# EAGLE library part 6200XX11121_62001011121 (library WR-PHD)
WR-PHD 2.00 mm THT Pin Header Article Properties Pins 2 unitless; 3 unitless; 4 unitless; 6 unitless; 8 unitless; 10 unitless; 20 unitless; 32 unitless General Information Operating Temperature -40 °C up to +105 °C Compliance Lead free / RoHS Pitch 2 mm Durability 50 Cycles Rows Single Gender Pin Header Type Straight Material Properties Insulator Material PA9T Insulator Flammability Rating UL94 V-0 Contact Material Copper Alloy Contact Plating Gold Contact Type Stamped Certification UL Approval E323964 Packaging Properties Packaging Bag Electrical Properties IR 2 A Withstanding Voltage 500 V (AC) Contact Resistance 20 mΩ RISO 1000 MΩ <https://www.we-online.com/components/media/o33219v209%20Family_WR-PHD_6200xx11121.jpg> Details see: www.we-online.com/en/components/products/PHD_2_00_THT_PIN_HEADER_6200XX11121 <www.we-online.com/catalog/PHD_2_00_THT_PIN_HEADER_6200XX11121/?utm_source=eagle_model&utm_medium=description_link&utm_campaign=eisos_eagle> Updated by Ella 2024-01-31 2024 (C) Würth Elektronik
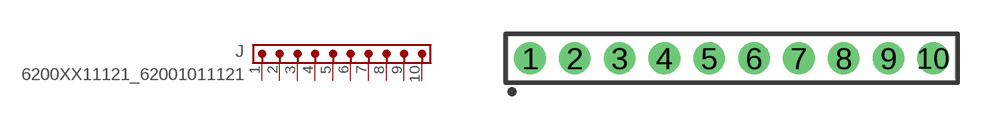
[diagram p286: symbol with the pads of 62001011121; footprint 62001011121]

Designator prefix J

## 6200XX11121_62001011121 (DATASHEET-URL: https://www.we-online.com/redexpert/spec/62001011121?ae; GENDER: Pin Header; IR: 2A; MOUNT: THT; PACKAGING: Bag; PART-NUMBER: 62001011121; PINS: 10; PITCH: 2.00 mm; ROWS: Single; TYPE: Straight; VALUE: 62001011121)  [62001011121]
1  1  pas
2  2  pas
3  3  pas
4  4  pas
5  5  pas
6  6  pas
7  7  pas
8  8  pas
9  9  pas
10  10  pas

## Footprint 62001011121 (pad centres in mm)
WR-PHD 2.00 mm THT Pin Header,10Pins
drill 0.9: 1 -9,0; 2 -7,0; 3 -5,0; 4 -3,0; 5 -1,0; 6 1,0; 7 3,0; 8 5,0; 9 7,0; 10 9,0